# Altium footprint library leaded.PcbLib: 197 footprints (part 2 of 13)
Each footprint in its own frame and in the unit in brackets; x right, y up, seen from the top. Pads: shape width x height; smd on the part's side, far side on the other; paste and mask are expansions set on the pad; w line width, h text height; cw(c..) or ccw(c..) is an arc to the next point about the centre after c.
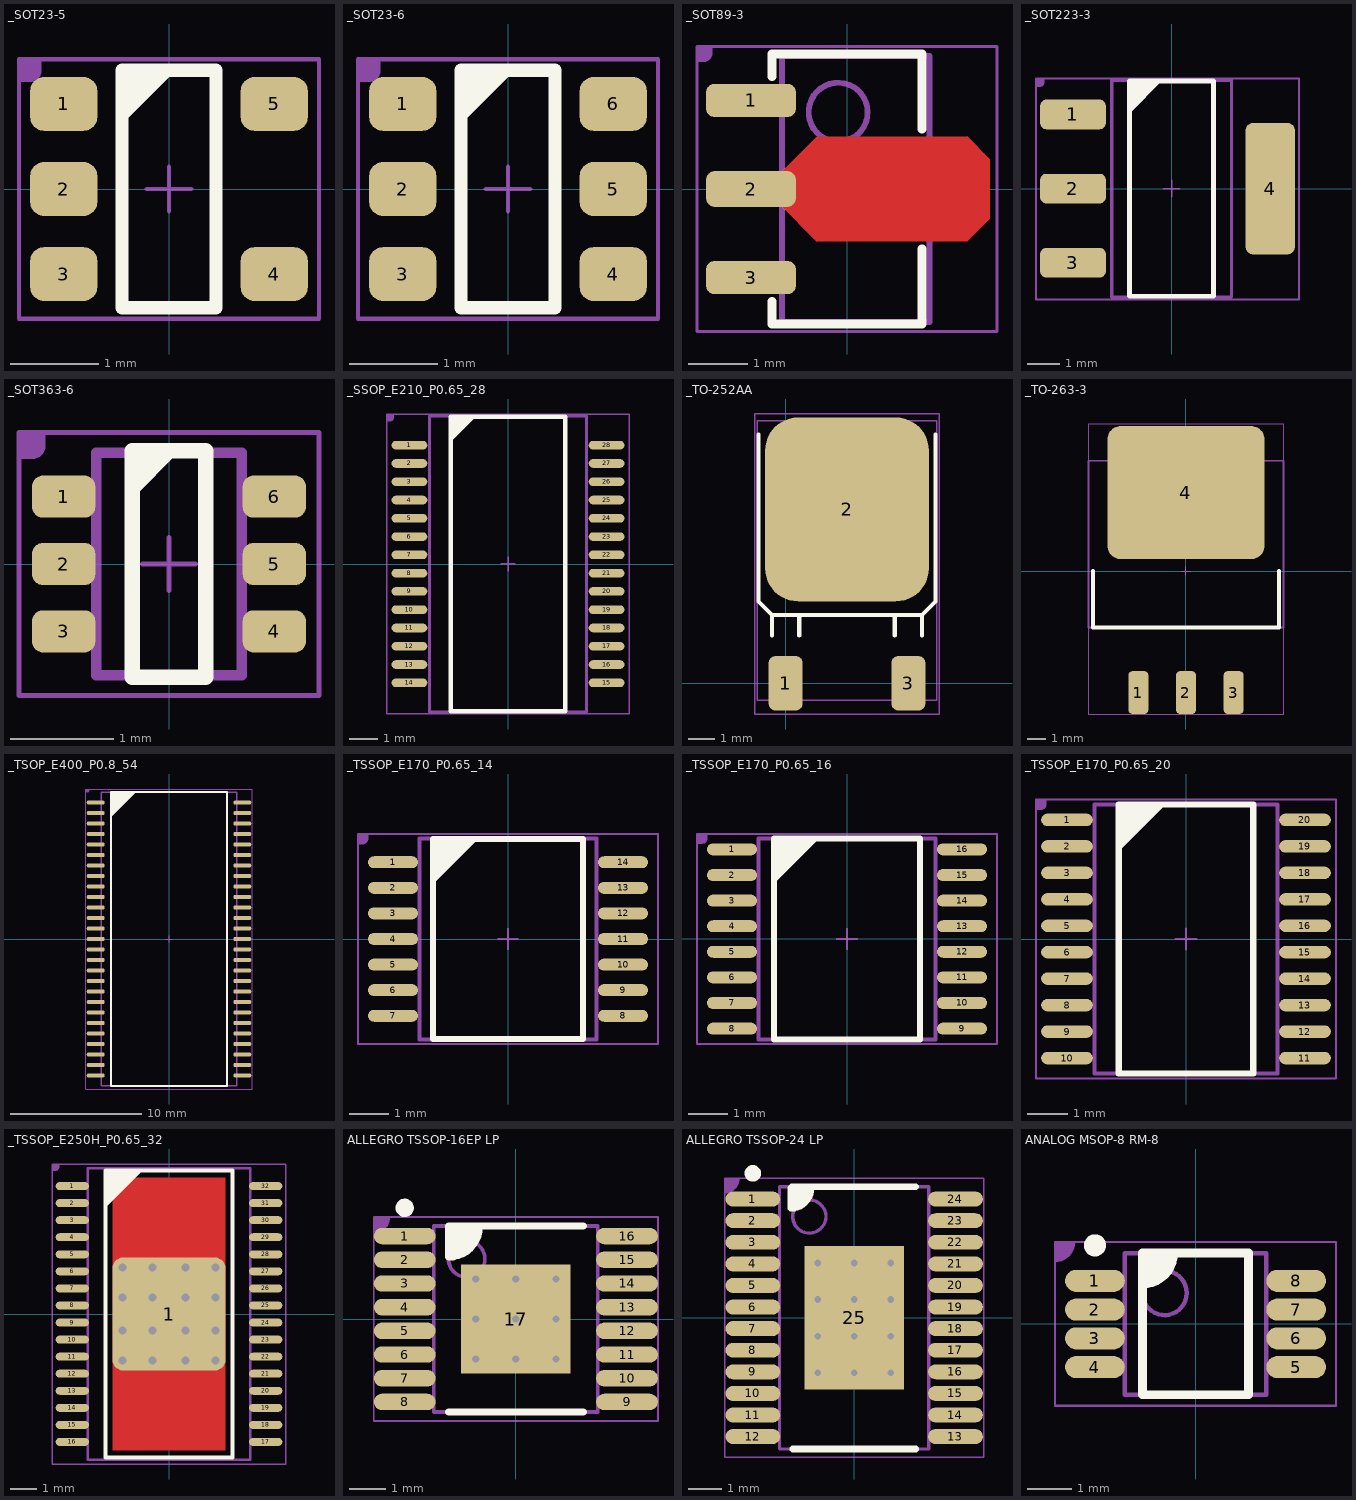
[diagram p1: the footprints below, top view; thin cyan lines are the x and y axes]

## _SOT23-5 [mil]
height 62.99
pads (5):
  rrect50% 30x24 smd: 1(-47,38) 2(-47,0) 3(-47,-38) 4(47,-38) 5(47,38)
Top Overlay:
  region: -21,53 3,53 -21,29
  lines w6: -21,-53 -21,53 21,53 21,-53 -21,-53
Mechanical 13:
  lines w2: -10,0 10,0 ; 0,-10 0,10
Top Component (Mech14):
  region: -67,58 -57,58 -57,53 -57,52.01 -57.76,50.17 -59.17,48.76 -61.01,48 -62,48 -67,48
  lines w2: -67,-58 67,-58 67,58 -67,58 -67,-58
  text ".Designator" at -25,-16 h60
3D body "User Library-SOT23-5-2.STEP": height 57.09, standoff 0, extent -55.11,-57.09 55.12,57.09

## _SOT23-6 [mil]
height 62.99
pads (6):
  rrect50% 30x24 smd: 1(-47,38) 2(-47,0) 3(-47,-38) 4(47,-38) 5(47,0) 6(47,38)
Top Overlay:
  region: -21,53 3,53 -21,29
  lines w6: -21,-53 21,-53 21,53 -21,53 -21,-53
Mechanical 13:
  lines w2: -10,0 10,0 ; 0,-10 0,10
Top Component (Mech14):
  region: -67,58 -57,58 -57,53 -57,52.01 -57.76,50.17 -59.17,48.76 -61.01,48 -62,48 -67,48
  lines w2: -67,-58 67,-58 67,58 -67,58 -67,-58
  text ".Designator" at -24,-16 h60
3D body "User Library-SOT23-6-2.STEP": height 57.09, standoff 0, extent -55.11,-57.09 55.12,57.09

## _SOT89-3 [mil]
height 59.06
pads (3):
  rrect50% 60x22 smd: 1(-64,59.06) 3(-64,-59.06)
  rrect50% 60x24 smd: 2(-64,0)
Top Layer:
  region: -45,10 -20,35 80,35 95,20 95,-20 80,-35 -20,-35 -45,-10
Top Overlay:
  lines w6: -50,-75 -50,-90 50,-90 50,-40 ; -50,75 -50,90 50,90 50,40
Mechanical 13:
  circle w3.94: c-5.91,51.18 r19.68
  lines w3.94: -13.78,0 25.59,0 ; 5.91,-19.69 5.91,19.68 ; -43.31,-88.58 -43.31,88.58 55.12,88.58 55.12,-88.58 -43.31,-88.58
Top Component (Mech14):
  region: -100,95 -90,95 -90,90 -90,89.01 -90.76,87.17 -92.17,85.76 -94.01,85 -95,85 -100,85
  lines w2: -100,-95 -100,95 100,95 100,-95 -100,-95
  text ".Designator" at -40,-28 h100
3D body "SOT89-150P410X150-3N.step": height 60.06, standoff 1, extent -82.67,-88.44 74.81,88.45

## _SOT223-3 [mil]
height 70.87
pads (4):
  rrect40% 80x36 smd: 1(-120,90.16) 2(-120,0) 3(-120,-90.16)
  rrect30% 60x160 smd: 4(120,0)
Top Overlay:
  region: -51.18,131 -11.81,131 -51.18,91.63
  lines w6: -51.18,-131 51.18,-131 51.18,131 -51.18,131 -51.18,-131
Mechanical 13:
  lines w2: -10,0 10,0 ; 0,-10 0,10
  lines w3.94: -72.83,-131.89 72.83,-131.89 72.83,131.89 -72.83,131.89 -72.83,-131.89
Top Component (Mech14):
  region: -165,134 -155,134 -155,129 -155,128.01 -155.76,126.17 -157.17,124.76 -159.01,124 -160,124 -165,124
  lines w2: -165,-135 155,-135 155,134 -165,134 -165,-135
  text ".Designator" at -40,-29 h100
3D body "SOT223-4.STEP": height 70.87, standoff 0, extent -143.69,-131.9 143.71,131.88

## _SOT363-6 [mil]
height 43.31
pads (6):
  rrect50% 24x16 smd: 1(-40,25.59) 2(-40,0) 3(-40,-25.59) 4(40,-25.59) 5(40,0) 6(40,25.59)
Top Overlay:
  region: -14,43 0,43 -14,29
  lines w6: -14,29 0,43 ; -14,-43 14,-43 14,43 -14,43 -14,-43
Mechanical 13:
  lines w2: -10,0 10,0 ; 0,-10 0,10
  lines w4: -27.56,-42.32 27.56,-42.32 27.56,42.32 -27.56,42.32 -27.56,-42.32
Top Component (Mech14):
  region: -57,50 -47,50 -47,45 -47,44.01 -47.76,42.17 -49.17,40.76 -51.01,40 -52,40 -57,40
  lines w2: -57,-50 57,-50 57,50 -57,50 -57,-50
  text ".Designator" at -24,-16 h60
3D body "SW3dPS-SC70-6.STEP": height 36.73, standoff -0.67, extent -41.33,-39.37 41.35,39.37

## _SSOP_E210_P0.65_28 [mil]
height 78.74
pads (28):
  oval 50x12 smd: 1(-138,166.34) 2(-138,140.75) 3(-138,115.16) 4(-138,89.57) 5(-138,63.98) 6(-138,38.39) 7(-138,12.8) 8(-138,-12.8) 9(-138,-38.39) 10(-138,-63.98) 11(-138,-89.57) 12(-138,-115.16) 13(-138,-140.75) 14(-138,-166.34) 15(138,-166.34) 16(138,-140.75) 17(138,-115.16) 18(138,-89.57) 19(138,-63.98) 20(138,-38.39) 21(138,-12.8) 22(138,12.8) 23(138,38.39) 24(138,63.98) 25(138,89.57) 26(138,115.16) 27(138,140.75) 28(138,166.34)
Top Overlay:
  region: -80,206 -45,206 -80,171
  lines w6: -80,-206 80,-206 80,206 -80,206 -80,-206
Mechanical 13:
  lines w2: -10,0 10,0 ; 0,-10 0,10
  lines w4: -110,-207 110,-207 110,207 -110,207 -110,-207
Top Component (Mech14):
  region: -170,210 -160,210 -160,205 -160,204.01 -160.76,202.17 -162.17,200.76 -164.01,200 -165,200 -170,200
  lines w2: -170,-210 170,-210 170,210 -170,210 -170,-210
  text ".Designator" at -40,-28 h100
3D body "User Library-SSOP-28-1.STEP": height 84.65, standoff 0, extent -152.66,-203.34 152.68,203.35

## _TO-252AA [mil]
pads (3):
  rrect40% 50x80 smd: 1(0,0) 3(180,0)
  rrect40% 240x270 smd: 2(90,255)
Top Overlay:
  lines w6: -40,365 -40,120 -20,100 ; -20,70 -20,100 ; 20,70 20,100 ; 160,70 160,100 ; 200,70 200,100 ; 220,365 220,120 200,100 ; -20,100 200,100
Mechanical 13:
  lines w2: -42,-25 -42,385 222,385 222,-25 -42,-25
Top Component (Mech14):
  lines w2: -45,-45 225,-45 225,395 -45,395 -45,-45
  text ".Designator" at 50,190 h100
3D body "TO-252.STEP": height 90.56, standoff -4.52, extent -38.73,-16.77 218.75,374.5

## _TO-263-3 [mil]
height 182.68
pads (4):
  rrect40% 42x90 smd: 1(-100,-255) 2(0,-255) 3(100,-255)
  rrect20% 330x280 smd: 4(0,165)
Top Overlay:
  lines w8: -195,0 -195,-118.11 195,-118.11 195,0
Mechanical 13:
  lines w2: -10,0 10,0 ; 0,-10 0,10
  lines w4: -204.72,-118.11 -204.72,231.89 204.72,231.89 204.72,-118.11 -204.72,-118.11
Top Component (Mech14):
  lines w2: -205,-300 -205,310 205,310 205,-300 -205,-300
  text ".Designator" at -40,-28 h100
3D body "SW3dPS-to-263.STEP": height 184.65, standoff 0, extent -199.99,-292.88 200.01,315

## _TSOP_E400_P0.8_54 [mil]
height 47.24
pads (54):
  oval 54x12 smd: 1(-220,409.45) 2(-220,377.95) 3(-220,346.46) 4(-220,314.96) 5(-220,283.46) 6(-220,251.97) 7(-220,220.47) 8(-220,188.98) 9(-220,157.48) 10(-220,125.98) 11(-220,94.49) 12(-220,62.99) 13(-220,31.5) 14(-220,0) 15(-220,-31.5) 16(-220,-62.99) 17(-220,-94.49) 18(-220,-125.98) 19(-220,-157.48) 20(-220,-188.98) 21(-220,-220.47) 22(-220,-251.97) 23(-220,-283.47) 24(-220,-314.96) 25(-220,-346.46) 26(-220,-377.95) 27(-220,-409.45) 28(220,-409.45) 29(220,-377.95) 30(220,-346.46) 31(220,-314.96) 32(220,-283.47) 33(220,-251.97) 34(220,-220.47) 35(220,-188.98) 36(220,-157.48) 37(220,-125.98) 38(220,-94.49) 39(220,-62.99) 40(220,-31.5) 41(220,0) 42(220,31.5) 43(220,62.99) 44(220,94.49) 45(220,125.98) 46(220,157.48) 47(220,188.98) 48(220,220.47) 49(220,251.97) 50(220,283.46) 51(220,314.96) 52(220,346.46) 53(220,377.95) 54(220,409.45)
Top Overlay:
  region: -174.21,440.94 -99.06,440.94 -174.21,365.79
  lines w6: -174.21,-440.94 174.21,-440.94 174.21,440.94 -174.21,440.94 -174.21,-440.94
Mechanical 13:
  lines w2: -10,0 10,0 ; 0,-10 0,10
  lines w4: -202.76,-440.94 202.76,-440.94 202.76,440.94 -202.76,440.94 -202.76,-440.94
Top Component (Mech14):
  region: -250,450 -240,450 -240,445 -240,444.01 -240.76,442.17 -242.17,440.76 -244.01,440 -245,440 -250,440
  lines w2: -250,-450 -250,450 250,450 250,-450 -250,-450
  text ".Designator" at -40,-28 h100
3D body "SW3dPS-TSOP2-54.STEP": height 51, standoff -15.9, extent -231.5,-437.8 231.5,437

## _TSSOP_E170_P0.65_14 [mil]
height 47.24
pads (14):
  oval 50x12 smd: 1(-115,76.77) 2(-115,51.18) 3(-115,25.59) 4(-115,0) 5(-115,-25.59) 6(-115,-51.18) 7(-115,-76.77) 8(115,-76.77) 9(115,-51.18) 10(115,-25.59) 11(115,0) 12(115,25.59) 13(115,51.18) 14(115,76.77)
Top Overlay:
  region: -75,100.47 -30,100.47 -75,55.47
  lines w6: -75,-100 -75,100 75,100 75,-100 -75,-100
Mechanical 13:
  lines w2: -10,0 10,0 ; 0,-10 0,10
  lines w3.94: -88.58,-100.39 -88.58,100.39 88.58,100.39 88.58,-100.39 -88.58,-100.39
Top Component (Mech14):
  region: -150,105 -140,105 -140,100 -140,99.01 -140.76,97.17 -142.17,95.76 -144.01,95 -145,95 -150,95
  lines w2: -150,-105 150,-105 150,105 -150,105 -150,-105
  text ".Designator" at -40,-28 h100
3D body "User Library-tssop14-2.STEP": height 47.24, standoff 0, extent -125.98,-100.39 125.99,100.4

## _TSSOP_E170_P0.65_16 [mil]
height 47.24
pads (16):
  oval 50x12 smd: 1(-115,89.57) 2(-115,63.98) 3(-115,38.39) 4(-115,12.8) 5(-115,-12.8) 6(-115,-38.39) 7(-115,-63.98) 8(-115,-89.57) 9(115,-89.57) 10(115,-63.98) 11(115,-38.39) 12(115,-12.8) 13(115,12.8) 14(115,38.39) 15(115,63.98) 16(115,89.57)
Top Overlay:
  region: -72.83,100.87 -27.83,100.87 -72.83,55.87
  lines w6: -72.83,-100.39 72.83,-100.39 72.83,100.39 -72.83,100.39 -72.83,-100.39
Mechanical 13:
  lines w2: -10,0 10,0 ; 0,-10 0,10
  lines w3.94: -88.58,-100.39 88.58,-100.39 88.58,100.39 -88.58,100.39 -88.58,-100.39
Top Component (Mech14):
  region: -150,105 -140,105 -140,100 -140,99.01 -140.76,97.17 -142.17,95.76 -144.01,95 -145,95 -150,95
  lines w2: -150,-105 150,-105 150,105 -150,105 -150,-105
  text ".Designator" at -39,-29 h100
3D body "User Library-tssop16-2.STEP": height 47.24, standoff 0, extent -125.98,-100.39 125.99,100.4

## _TSSOP_E170_P0.65_20 [mil]
height 47.24
pads (20):
  oval 50x12 smd: 1(-115,115.16) 2(-115,89.57) 3(-115,63.98) 4(-115,38.39) 5(-115,12.8) 6(-115,-12.8) 7(-115,-38.39) 8(-115,-63.98) 9(-115,-89.57) 10(-115,-115.16) 11(115,-115.16) 12(115,-89.57) 13(115,-63.98) 14(115,-38.39) 15(115,-12.8) 16(115,12.8) 17(115,38.39) 18(115,63.98) 19(115,89.57) 20(115,115.16)
Top Overlay:
  region: -65,130 -20,130 -65,85
  lines w6: -65,-130 65,-130 65,130 -65,130 -65,-130
Mechanical 13:
  lines w2: -10,0 10,0 ; 0,-10 0,10
  lines w3.94: -88.58,-129.92 88.58,-129.92 88.58,129.92 -88.58,129.92 -88.58,-129.92
Top Component (Mech14):
  region: -145,135 -135,135 -135,130 -135,129.01 -135.76,127.17 -137.17,125.76 -139.01,125 -140,125 -145,125
  lines w2: -145,-135 -145,135 145,135 145,-135 -145,-135
  text ".Designator" at -40,-27 h100
3D body "User Library-TSSOP-20 6_6x4_4.STEP": height 41.69, standoff -1.62, extent -125.98,-129.91 125.99,129.93

## _TSSOP_E250H_P0.65_32 [mil]
height 47.24
pads (33):
  oval 50x12 smd: 1(-145,191.93) 2(-145,166.34) 3(-145,140.75) 4(-145,115.16) 5(-145,89.57) 6(-145,63.98) 7(-145,38.39) 8(-145,12.8) 9(-145,-12.8) 10(-145,-38.39) 11(-145,-63.98) 12(-145,-89.57) 13(-145,-115.16) 14(-145,-140.75) 15(-145,-166.34) 16(-145,-191.93) 17(145,-191.93) 18(145,-166.34) 19(145,-140.75) 20(145,-115.16) 21(145,-89.57) 22(145,-63.98) 23(145,-38.39) 24(145,-12.8) 25(145,12.8) 26(145,38.39) 27(145,63.98) 28(145,89.57) 29(145,115.16) 30(145,140.75) 31(145,166.34) 32(145,191.93)
  rrect20% 170x170 smd: 1(0,0)
via -70,-70 diameter 24 hole 12
via 70,-70 diameter 24 hole 12
via -25,-70 diameter 24 hole 12
via 25,-70 diameter 24 hole 12
via 25,-25 diameter 24 hole 12
via -25,-25 diameter 24 hole 12
via 70,-25 diameter 24 hole 12
via -70,-25 diameter 24 hole 12
via 70,25 diameter 24 hole 12
via -70,25 diameter 24 hole 12
via 25,25 diameter 24 hole 12
via -25,25 diameter 24 hole 12
via -25,70 diameter 24 hole 12
via 25,70 diameter 24 hole 12
via -70,70 diameter 24 hole 12
via 70,70 diameter 24 hole 12
Top Layer:
  rectangle: -85,-205 85,205
Top Overlay:
  region: -95,215 -40,215 -95,160
  lines w6: -95,-215 95,-215 95,215 -95,215 -95,-215
Mechanical 13:
  lines w2: -10,0 10,0 ; 0,-10 0,10
  lines w3.94: -122.05,-218.5 122.05,-218.5 122.05,218.5 -122.05,218.5 -122.05,-218.5
Top Component (Mech14):
  region: -175,225 -165,225 -165,220 -165,219.01 -165.76,217.17 -167.17,215.76 -169.01,215 -170,215 -175,215
  lines w2: -175,-225 175,-225 175,225 -175,225 -175,-225
  text ".Designator" at -41,-26 h100
3D body "SW3dPS-SSOP30-P065.STEP": height 43.26, standoff -1.57, extent -157.48,-180.79 157.48,207

## ALLEGRO TSSOP-16EP LP [mm] "TSSOP, 16-Leads, Body 5.00x4.40mm, Pitch 0.65mm, Thermal Pad 3.00x3.00mm, IPC Medium Density"
height 1.2
pads (17):
  oval 1.7x0.45 smd: 1(-3.05,2.275) 2(-3.05,1.625) 3(-3.05,0.975) 4(-3.05,0.325) 5(-3.05,-0.325) 6(-3.05,-0.975) 7(-3.05,-1.625) 8(-3.05,-2.275) 9(3.05,-2.275) 10(3.05,-1.625) 11(3.05,-0.975) 12(3.05,-0.325) 13(3.05,0.325) 14(3.05,0.975) 15(3.05,1.625) 16(3.05,2.275)
  rect 3x3 smd: 17(0,0)
via 1.1,-1.1 diameter 0.5 hole 0.2
via 0,-1.1 diameter 0.5 hole 0.2
via -1.1,-1.1 diameter 0.5 hole 0.2
via 1.1,0 diameter 0.5 hole 0.2
via 0,0 diameter 0.5 hole 0.2
via -1.1,0 diameter 0.5 hole 0.2
via 1.1,1.1 diameter 0.5 hole 0.2
via 0,1.1 diameter 0.5 hole 0.2
via -1.1,1.1 diameter 0.5 hole 0.2
Top Overlay:
  circle w0.25: c-3.05,3.05 r0.125
  region: -1.85,2.55 -1,2.55 -1,2.2 -1.5,1.7 -1.85,1.7
  lines w0.2: -1.85,-2.55 1.85,-2.55 ; -1,2.55 cw(c-1.85,2.55) -1.85,1.7 -1.85,2.55 1.85,2.55
Mechanical 13:
  circle w0.1: c-1.35,1.65 r0.5
  lines w0.1: -2.25,-2.55 2.25,-2.55 2.25,2.55 -2.25,2.55 -2.25,-2.55
Top Component (Mech14):
  region: -3.9,2.8 -3.9,2.362 -3.817,2.362 -3.766,2.413 -3.683,2.413 -3.505,2.591 -3.505,2.681 -3.469,2.718 -3.469,2.8
  lines w0.05: -3.9,-2.8 3.9,-2.8 3.9,2.8 -3.9,2.8 -3.9,-2.8
  lines w0.051: -3.9,2.369 ccw(c-3.9,2.8) -3.469,2.8
  text ".Designator" at -0.61,-0.406 h1.52
3D body "Allegro TSSOP-16.STEP": height 1.2, standoff 0, extent -3.206,-2.5 3.206,2.5

## ALLEGRO TSSOP-24 LP [mm] "TSSOP, 24-Leads, Body 7.80x4.40mm, Pitch 0.65mm, Thermal Pad 4.32x3.00mm, IPC Medium Density"
height 1.2
pads (25):
  oval 1.65x0.45 smd: 1(-3.05,3.575) 2(-3.05,2.925) 3(-3.05,2.275) 4(-3.05,1.625) 5(-3.05,0.975) 6(-3.05,0.325) 7(-3.05,-0.325) 8(-3.05,-0.975) 9(-3.05,-1.625) 10(-3.05,-2.275) 11(-3.05,-2.925) 12(-3.05,-3.575) 13(3.05,-3.575) 14(3.05,-2.925) 15(3.05,-2.275) 16(3.05,-1.625) 17(3.05,-0.975) 18(3.05,-0.325) 19(3.05,0.325) 20(3.05,0.975) 21(3.05,1.625) 22(3.05,2.275) 23(3.05,2.925) 24(3.05,3.575)
  rect 3x4.32 smd: 25(0,0)
via -1.1,1.65 diameter 0.5 hole 0.2
via 0,1.65 diameter 0.5 hole 0.2
via 1.1,1.65 diameter 0.5 hole 0.2
via -1.1,0.55 diameter 0.5 hole 0.2
via 0,0.55 diameter 0.5 hole 0.2
via 1.1,0.55 diameter 0.5 hole 0.2
via -1.1,-0.55 diameter 0.5 hole 0.2
via 0,-0.55 diameter 0.5 hole 0.2
via 1.1,-0.55 diameter 0.5 hole 0.2
via -1.1,-1.65 diameter 0.5 hole 0.2
via 0,-1.65 diameter 0.5 hole 0.2
via 1.1,-1.65 diameter 0.5 hole 0.2
Top Overlay:
  circle w0.25: c-3.05,4.35 r0.125
  region: -1.3,3.95 -1.3,3.9 -1.3,3.781 -1.391,3.56 -1.56,3.391 -1.781,3.3 -1.9,3.3 -1.9,3.9
  lines w0.2: -1.85,-3.95 1.85,-3.95 ; -1.3,3.95 -1.3,3.9 cw(c-1.9,3.9) -1.9,3.3 -1.9,3.9 cw(c-1.85,3.9) -1.85,3.95 1.85,3.95
Mechanical 13:
  circle w0.1: c-1.35,3.05 r0.5
  lines w0.1: -2.25,-3.95 -2.25,3.95 2.25,3.95 2.25,-3.95 -2.25,-3.95
Top Component (Mech14):
  region: -3.9,4.2 -3.9,3.762 -3.817,3.762 -3.766,3.813 -3.683,3.813 -3.505,3.991 -3.505,4.081 -3.469,4.118 -3.469,4.2
  lines w0.05: -3.9,-4.2 -3.9,4.2 3.9,4.2 3.9,-4.2 -3.9,-4.2
  lines w0.051: -3.9,3.769 ccw(c-3.9,4.2) -3.469,4.2
  text ".Designator" at -0.61,-0.406 h1.52
3D body "TSSOP-24.STEP": height 1.2, standoff 0, extent -3.21,-3.9 3.211,3.9

## ANALOG MSOP-8 RM-8 [mm]
height 1.1
pads (8):
  oval 1.35x0.5 smd: 1(-2.275,0.975) 2(-2.275,0.325) 3(-2.275,-0.325) 4(-2.275,-0.975) 5(2.275,-0.975) 6(2.275,-0.325) 7(2.275,0.325) 8(2.275,0.975)
Top Overlay:
  circle w0.25: c-2.275,1.775 r0.125
  region: -1.2,1.6 -0.5,1.6 -0.5,1.3 -0.9,0.9 -1.2,0.9
  lines w0.2: -1.2,0.9 ccw(c-1.2,1.6) -0.5,1.6 ; -1.2,-1.6 -1.2,1.6 1.2,1.6 1.2,-1.6 -1.2,-1.6
Mechanical 13:
  circle w0.1: c-0.7,0.7 r0.5
  lines w0.1: -1.6,-1.6 -1.6,1.6 1.6,1.6 1.6,-1.6 -1.6,-1.6
Top Component (Mech14):
  region: -3.175,1.85 -3.175,1.412 -3.092,1.412 -3.041,1.463 -2.958,1.463 -2.78,1.641 -2.78,1.731 -2.744,1.768 -2.744,1.85
  lines w0.05: -3.175,-1.85 -3.175,1.85 3.175,1.85 3.175,-1.85 -3.175,-1.85
  lines w0.051: -3.175,1.419 ccw(c-3.175,1.85) -2.744,1.85
  text ".Designator" at -0.61,-0.406 h1.52
3D body "MSOP-8.STEP": height 1.1, standoff 0, extent -2.46,-1.5 2.461,1.5